# Altium schematic symbol library Schlib2.SchLib: 7 symbols
Pins are listed as number, name and electrical type; pins without a type are passive.

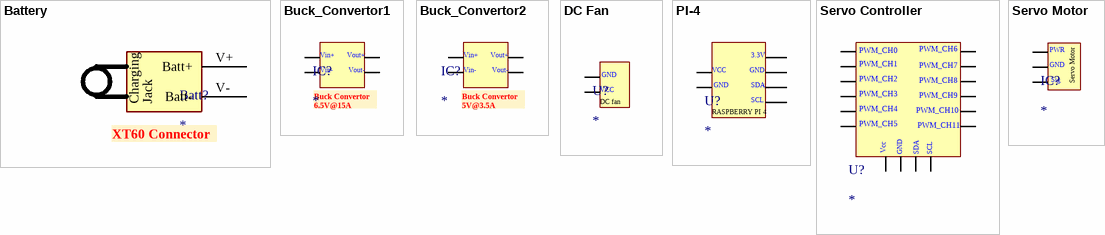
[diagram p0: symbols Battery to Servo Motor]

## Battery
designator Batt?
pins: V+ Batt+ (power), V- Batt- (power)
text: Charging; Jack; XT60 Connector

## Buck_Convertor1
designator IC?
text: Vin+; Vout+; Vin-; Vout-; Buck Convertor 6.5V@15A

## Buck_Convertor2
designator IC?
text: Vin+; Vout+; Vin-; Vout-; Buck Convertor 5V@3.5A

## DC Fan
designator U?
text: GND; VCC; DC fan

## PI-4
designator U?
text: 3.3V; VCC; GND; SDA; SCL; RASPBERRY PI 4

## Servo Controller
designator U?
text: PWM_CH6; PWM_CH0; PWM_CH1; PWM_CH7; PWM_CH2; PWM_CH8; PWM_CH3; PWM_CH9; PWM_CH4; PWM_CH10; PWM_CH5; PWM_CH11; Vcc; GND; SDA; SCL

## Servo Motor
designator IC?
text: PWR; GND; Sig